# Altium integrated library TPS7A5401QRGRRQ1.IntLib: 1 symbol
Pins are listed as number, name and electrical type; pins without a type are passive.

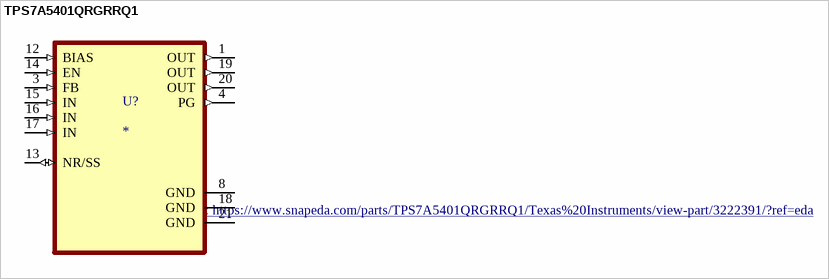
[diagram p0: symbol TPS7A5401QRGRRQ1]

## TPS7A5401QRGRRQ1
designator U?
Automotive 4-A, low-VIN (1.1-V), low-noise, high-accuracy, ultra-low-dropout (LDO) voltage regulator 20-VQFN -40 to 150; MF: Texas Instruments; MP: TPS7A5401QRGRRQ1; Value: *; SnapEDA_Link: https://www.snapeda.com/parts/TPS7A5401QRGRRQ1/Texas%20Instruments/view-part/3222391/?ref=snap; Texas_Instruments-Purchase-URL: https://snapeda.com/shop?store=Texas+Instruments&id=3222391; Mouser-Purchase-URL: https://snapeda.com/shop?store=Mouser&id=3222391; Availability: Warning; Price: None; Package: VQFN-20 Texas Instruments; DigiKey-Purchase-URL: https://snapeda.com/shop?store=DigiKey&id=3222391; Check_prices: https://www.snapeda.com/parts/TPS7A5401QRGRRQ1/Texas%20Instruments/view-part/3222391/?ref=eda
footprint QFN50P350X350X100-21N
pins: 1 OUT (out), 3 FB (in), 4 PG (out), 8 GND (power), 12 BIAS (in), 13 NR/SS (io), 14 EN (in), 15 IN (in), 16 IN (in), 17 IN (in), 18 GND (power), 19 OUT (out), 20 OUT (out), 21 GND (power)